# Altium integrated library Capacitor.IntLib: 1 symbol
Pins are listed as number, name and electrical type; pins without a type are passive.

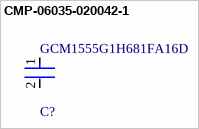
[diagram p0: symbol CMP-06035-020042-1]

## CMP-06035-020042-1
designator C?, comment GCM1555G1H681FA16D
Ceramic Capacitor for Automotive 680pF ±1% 50VDC X8G 0402 Paper T/R
footprint FP-GCM155-0_05-MFG
footprint FP-GCM155-0_05-IPC_C
footprint FP-GCM155-0_05-IPC_A
footprint FP-GCM155-0_05-IPC_B
pins: 1, 2